# Altium schematic symbol library TitansLib.SchLib: 462 symbols (part 24 of 24)
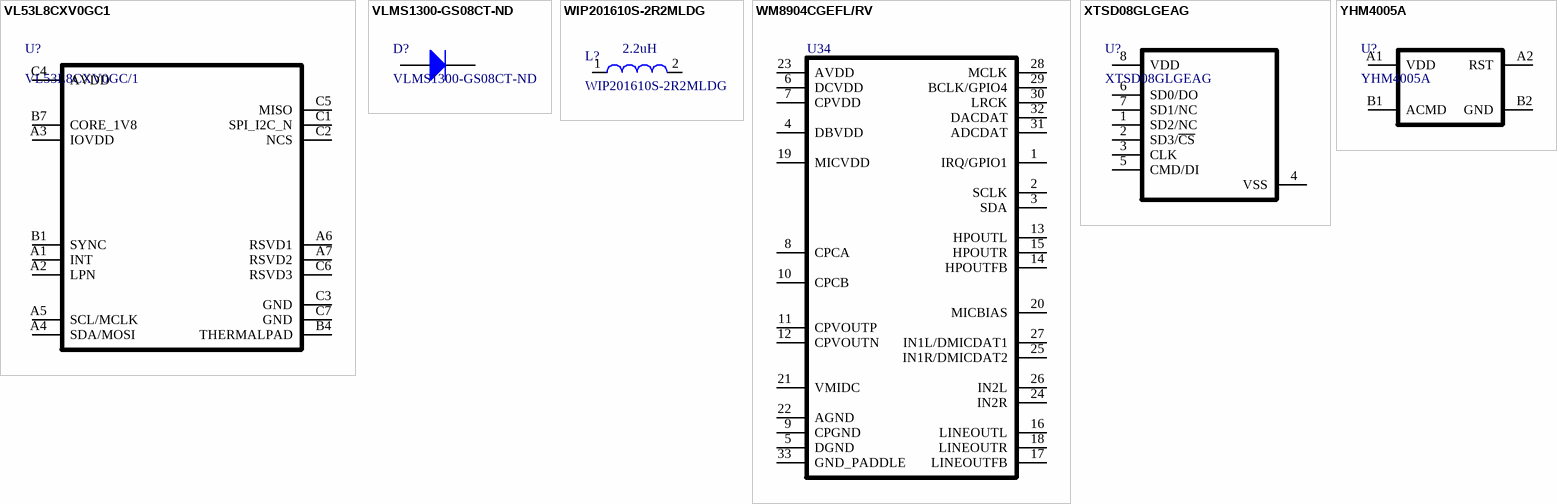
[diagram p40: symbols VL53L8CXV0GC1 to YHM4005A]

## XTSD08GLGEAG
designator U?
Embeeded SD NAND; Manufacturer: XTX; Manufacturer Part Number: XTSD08GLGEAG
footprint LGA4C127P2X4_800X600X85 (LGA, 4-Leads, Body 8.00x6.00mmx0.85mm, Pitch 1.27mm)
pins: 1 SD2/NC, 2 SD3/~{CS}, 3 CLK, 4 VSS, 5 CMD/DI, 6 SD0/DO, 7 SD1/NC, 8 VDD

## YHM4005A
designator U?
The YHM4005 family is an ultra-low power consumption watchdog timer.; Manufacturer Part Number: YHM4005A
pins: A1 VDD, A2 RST, B1 ACMD, B2 GND